# Altium schematic symbol library Kondensator_470uF_25V.SchLib: 1 symbol
Pins are listed as number, name and electrical type; pins without a type are passive.

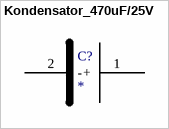
[diagram p0: symbol Kondensator_470uF/25V]

## Kondensator_470uF/25V
designator C?
footprint Capacitor_470uF/25V
pins: 1 +, 2 -